# Altium footprint library ATMEGA328P-MU.PcbLib: 1 footprints
Each footprint in its own frame and in the unit in brackets; x right, y up, seen from the top. Pads: shape width x height; smd on the part's side, far side on the other; paste and mask are expansions set on the pad; w line width, h text height; cw(c..) or ccw(c..) is an arc to the next point about the centre after c.
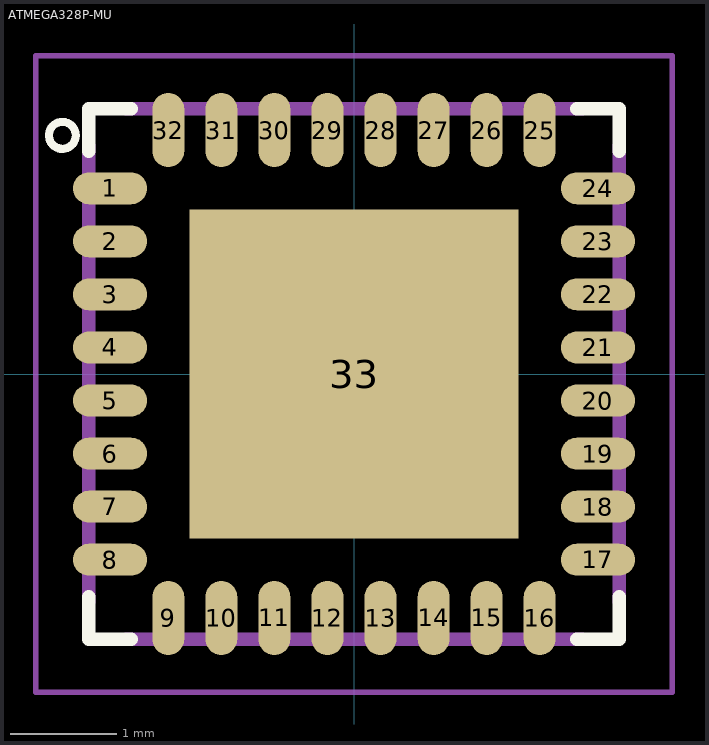
[diagram p0: the footprint, top view; thin cyan lines are the x and y axes]

## ATMEGA328P-MU [mm] "AVR ATmega Microcontroller IC 8-Bit 20MHz 32KB (16K x 16) FLASH 32-VQFN (5x5)"
pads (33):
  oval 0.7x0.3 smd mask+0: 1(-2.3,1.75) 2(-2.3,1.25) 3(-2.3,0.75) 4(-2.3,0.25) 5(-2.3,-0.25) 6(-2.3,-0.75) 7(-2.3,-1.25) 8(-2.3,-1.75) 17(2.3,-1.75) 18(2.3,-1.25) 19(2.3,-0.75) 20(2.3,-0.25) 21(2.3,0.25) 22(2.3,0.75) 23(2.3,1.25) 24(2.3,1.75)
  oval 0.3x0.7 smd mask+0: 9(-1.75,-2.3) 10(-1.25,-2.3) 11(-0.75,-2.3) 12(-0.25,-2.3) 13(0.25,-2.3) 14(0.75,-2.3) 15(1.25,-2.3) 16(1.75,-2.3) 25(1.75,2.3) 26(1.25,2.3) 27(0.75,2.3) 28(0.25,2.3) 29(-0.25,2.3) 30(-0.75,2.3) 31(-1.25,2.3) 32(-1.75,2.3)
  rect 3.1x3.1 smd paste-3: 33(0,0)
Top Overlay:
  circle w0.076: c-2.75,2.25 r0.127
  lines w0.127: -2.5,-2.1 -2.5,-2.5 -2.1,-2.5 ; -2.5,2.1 -2.5,2.5 -2.1,2.5 ; 2.1,-2.5 2.5,-2.5 2.5,-2.1 ; 2.1,2.5 2.5,2.5 2.5,2.1
Top Paste:
  region: 0.98,-0.982 -0.982,-0.982 -0.982,0.98 0.98,0.98
Top Solder:
  lines w0.4: -2.499,-1.749 -2.099,-1.749 ; -2.499,-1.249 -2.099,-1.249 ; -2.499,-0.749 -2.099,-0.749 ; -2.499,-0.249 -2.099,-0.249 ; -2.499,0.251 -2.099,0.251 ; -2.499,0.751 -2.099,0.751 ; -2.499,1.251 -2.099,1.251 ; -2.499,1.751 -2.099,1.751 ; -1.749,-2.499 -1.749,-2.099 ; -1.749,2.101 -1.749,2.501 ; -1.249,-2.499 -1.249,-2.099 ; -1.249,2.101 -1.249,2.501 ; -0.749,-2.499 -0.749,-2.099 ; -0.749,2.101 -0.749,2.501 ; -0.249,-2.499 -0.249,-2.099 ; -0.249,2.101 -0.249,2.501 ; 0.251,-2.499 0.251,-2.099 ; 0.251,2.101 0.251,2.501 ; 0.751,-2.499 0.751,-2.099 ; 0.751,2.101 0.751,2.501 ; 1.251,-2.499 1.251,-2.099 ; 1.251,2.101 1.251,2.501 ; 1.751,-2.499 1.751,-2.099 ; 1.751,2.101 1.751,2.501 ; 2.101,-1.749 2.501,-1.749 ; 2.101,-1.249 2.501,-1.249 ; 2.101,-0.749 2.501,-0.749 ; 2.101,-0.249 2.501,-0.249 ; 2.101,0.251 2.501,0.251 ; 2.101,0.751 2.501,0.751 ; 2.101,1.251 2.501,1.251 ; 2.101,1.751 2.501,1.751
Mechanical 13:
  lines w0.127: -2.499,-2.149 -2.499,2.151 ; -2.149,-2.499 2.151,-2.499 ; -2.149,2.501 2.151,2.501 ; 2.501,-2.149 2.501,2.151
  lines w0.23: -2.424,-1.749 -2.199,-1.749 ; -2.424,-1.249 -2.199,-1.249 ; -2.424,-0.749 -2.199,-0.749 ; -2.424,-0.249 -2.199,-0.249 ; -2.424,0.251 -2.199,0.251 ; -2.424,0.751 -2.199,0.751 ; -2.424,1.251 -2.199,1.251 ; -2.424,1.751 -2.199,1.751 ; -1.749,-2.424 -1.749,-2.199 ; -1.749,2.201 -1.749,2.426 ; -1.249,-2.424 -1.249,-2.199 ; -1.249,2.201 -1.249,2.426 ; -0.749,-2.424 -0.749,-2.199 ; -0.749,2.201 -0.749,2.426 ; -0.249,-2.424 -0.249,-2.199 ; -0.249,2.201 -0.249,2.426 ; 0.251,-2.424 0.251,-2.199 ; 0.251,2.201 0.251,2.426 ; 0.751,-2.424 0.751,-2.199 ; 0.751,2.201 0.751,2.426 ; 1.251,-2.424 1.251,-2.199 ; 1.251,2.201 1.251,2.426 ; 1.751,-2.424 1.751,-2.199 ; 1.751,2.201 1.751,2.426 ; 2.201,-1.749 2.426,-1.749 ; 2.201,-1.249 2.426,-1.249 ; 2.201,-0.749 2.426,-0.749 ; 2.201,-0.249 2.426,-0.249 ; 2.201,0.251 2.426,0.251 ; 2.201,0.751 2.426,0.751 ; 2.201,1.251 2.426,1.251 ; 2.201,1.751 2.426,1.751
Mechanical 15:
  lines w0.05: -3,-3 -3,3 3,3 3,-3 -3,-3
3D body "step_temp.STEP": height 1.01, standoff 0.01, extent -2.5,-2.5 2.5,2.5